# Altium footprint library MY_LIB_Connectors_Amass.PcbLib: 25 footprints (part 2 of 2)
Each footprint in its own frame and in the unit in brackets; x right, y up, seen from the top. Pads: shape width x height; smd on the part's side, far side on the other; paste and mask are expansions set on the pad; w line width, h text height; cw(c..) or ccw(c..) is an arc to the next point about the centre after c.
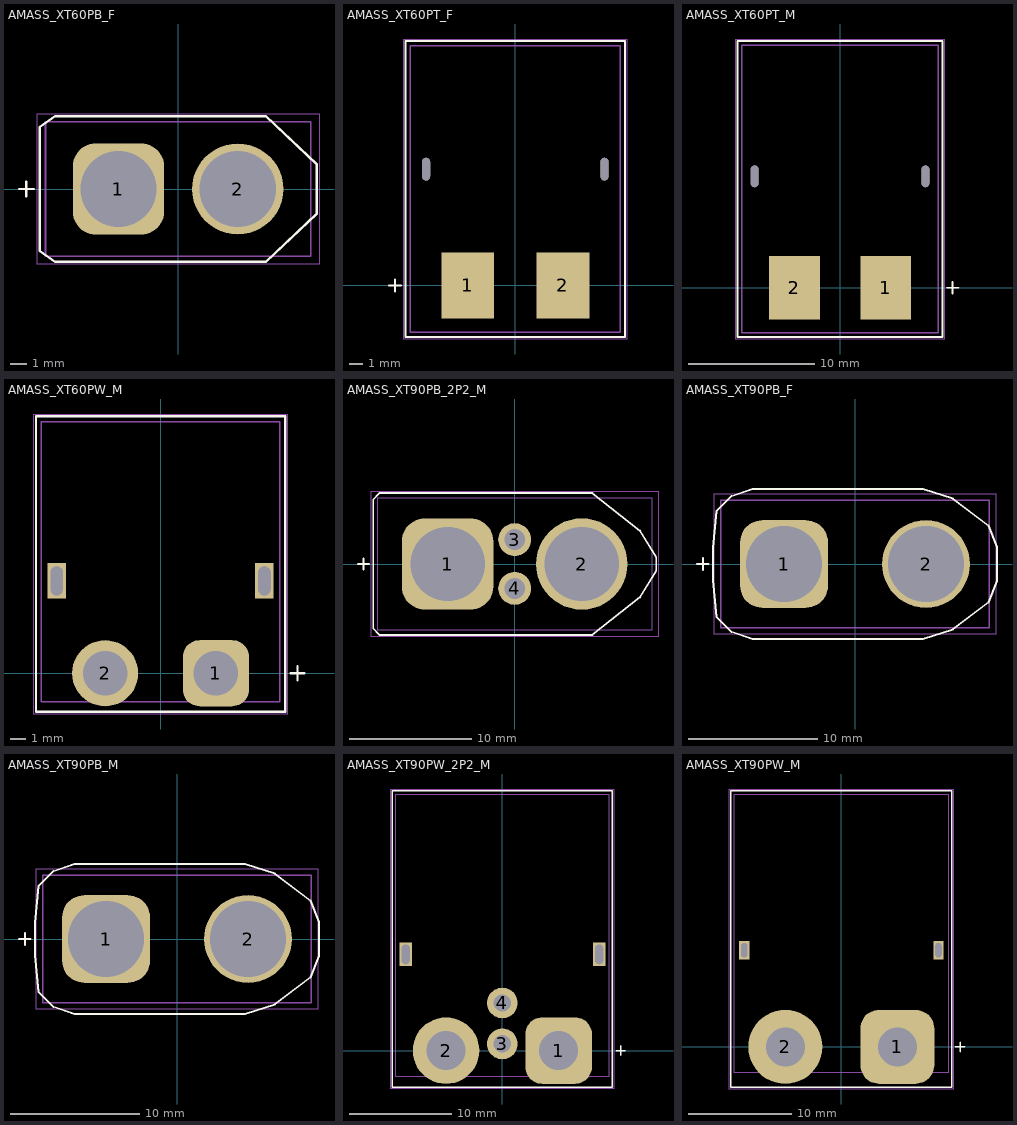
[diagram p1: the footprints below, top view; thin cyan lines are the x and y axes]

## AMASS_XT60PB_F [mm] "AMASS_XT60PB_F; AMASS board-mount connector"
height 16.7
pads (2):
  rrect50% 5.5x5.5 hole 4.6 paste+0 mask+0.05: 1(-3.6,0)
  round 5.5 hole 4.6 paste+0 mask+0.05: 2(3.6,0)
Top Overlay:
  lines w0.15: -9.6,0 -8.7,0 ; -9.15,-0.45 -9.15,0.45 ; -8.35,-3.73 -7.412,-4.4 5.289,-4.4 8.35,-1.501 8.35,1.501 5.289,4.4 -7.412,4.4 -8.35,3.73 -8.35,-3.73
Mechanical 1:
  lines w0.1: -8,-4.05 8,-4.05 8,4.05 -8,4.05 -8,-4.05
Mechanical 15:
  lines w0.05: -8.5,-4.55 8.5,-4.55 8.5,4.55 -8.5,4.55 -8.5,-4.55
3D body "AMASS_XT60PB_F.step": height 16.7, standoff -3, extent -8,-4.05 8,4.05

## AMASS_XT60PT_F [mm] "AMASS_XT60PT_F; AMASS board-mount connector"
height 10
pads (4):
  rect 4x5 smd paste+0 mask+0.05: 1(-3.6,0) 2(3.6,0)
  oval 0.6x1.7 hole 0.6 slot 1.7 at 90 deg unplated paste+0 mask+0.05: ""(-6.75,8.8) ""(6.75,8.8)
Top Overlay:
  lines w0.15: -9.55,0 -8.65,0 ; -9.1,-0.45 -9.1,0.45 ; -8.3,-3.9 8.3,-3.9 8.3,18.5 -8.3,18.5 -8.3,-3.9
Mechanical 1:
  lines w0.1: -7.95,-3.55 7.95,-3.55 7.95,18.15 -7.95,18.15 -7.95,-3.55
Mechanical 15:
  lines w0.05: -8.45,-4.05 8.45,-4.05 8.45,18.65 -8.45,18.65 -8.45,-4.05
3D body "AMASS_XT60PT_F.step": height 8.4, standoff -1.5, extent -7.95,-3.55 7.95,18.15

## AMASS_XT60PT_M [mm] "AMASS_XT60PT_M; AMASS board-mount connector"
height 8.4
pads (4):
  rect 4x5 smd paste+0 mask+0.05: 1(3.6,0) 2(-3.6,0)
  oval 0.6x1.7 hole 0.6 slot 1.7 at 90 deg unplated paste+0 mask+0.05: ""(-6.75,8.8) ""(6.75,8.8)
Top Overlay:
  lines w0.15: 8.45,0 9.35,0 ; 8.9,-0.45 8.9,0.45 ; -8.1,-3.9 8.1,-3.9 8.1,19.5 -8.1,19.5 -8.1,-3.9
Mechanical 1:
  lines w0.1: -7.75,-3.55 7.75,-3.55 7.75,19.15 -7.75,19.15 -7.75,-3.55
Mechanical 15:
  lines w0.05: -8.25,-4.05 8.25,-4.05 8.25,19.65 -8.25,19.65 -8.25,-4.05
3D body "AMASS_XT60PT_M.step": height 8.4, standoff -1.5, extent -7.75,-3.55 7.75,19.15

## AMASS_XT60PW_M [mm] "AMASS_XT60PW_M; AMASS board-mount connector"
height 8.4
pads (4):
  rrect50% 4.3x4.3 hole 2.9 paste+0 mask+0.05: 1(3.6,0)
  round 4.3 hole 2.9 paste+0 mask+0.05: 2(-3.6,0)
  rect 1.2x2.3 hole 0.8 slot 1.9 at 90 deg paste+0 mask+0.05: ""(-6.75,6) ""(6.75,6)
Top Overlay:
  lines w0.15: 8.45,0 9.35,0 ; 8.9,-0.45 8.9,0.45 ; -8.1,-2.5 8.1,-2.5 8.1,16.7 -8.1,16.7 -8.1,-2.5
Mechanical 1:
  lines w0.1: -7.75,-1.85 7.75,-1.85 7.75,16.35 -7.75,16.35 -7.75,-1.85
Mechanical 15:
  lines w0.05: -8.25,-2.65 8.25,-2.65 8.25,16.85 -8.25,16.85 -8.25,-2.65
3D body "AMASS_XT60PW_M.step": height 8.1, standoff -3, extent -7.75,-1.85 7.75,16.35

## AMASS_XT90PB_2P2_M [mm] "AMASS_XT90PB_2P2_M; AMASS board-mount connector"
height 20.7
pads (4):
  rrect50% 7.5x7.5 hole 6.1 paste+0 mask+0.05: 1(-5.5,0)
  round 7.5 hole 6.1 paste+0 mask+0.05: 2(5.5,0)
  round 2.7 hole 1.7 paste+0 mask+0.05: 3(0,2) 4(0,-2)
Top Overlay:
  lines w0.15: -12.85,0 -11.95,0 ; -12.4,-0.45 -12.4,0.45 ; -11.6,-5.292 -11.098,-5.81 6.371,-5.81 10.266,-2.736 11.6,-0.548 11.6,0.548 10.266,2.736 6.371,5.81 -11.098,5.81 -11.6,5.292 -11.6,-5.292
Mechanical 1:
  lines w0.1: -11.25,-5.45 11.25,-5.45 11.25,5.45 -11.25,5.45 -11.25,-5.45
Mechanical 15:
  lines w0.05: -11.75,-5.95 11.75,-5.95 11.75,5.95 -11.75,5.95 -11.75,-5.95
3D body "AMASS_XT90PB_2P2_M.step": height 20.7, standoff -3, extent -11.25,-5.45 11.25,5.45

## AMASS_XT90PB_F [mm] "AMASS_XT90PB_F; AMASS board-mount connector"
height 19.7
pads (2):
  rrect50% 6.8x6.8 hole 5.9 paste+0 mask+0.05: 1(-5.5,0)
  round 6.8 hole 5.9 paste+0 mask+0.05: 2(5.5,0)
Top Overlay:
  lines w0.15: -12.25,0 -11.35,0 ; -11.8,-0.45 -11.8,0.45 ; -11,-1.266 -10.737,-4.108 -9.589,-5.256 -7.957,-5.8 5.254,-5.8 7.583,-5.065 10.339,-2.97 11,-1.317 11,1.317 10.339,2.97 7.583,5.065 5.254,5.8 -7.957,5.8 -9.589,5.256 -10.737,4.108 -11,1.266 -11,-1.266
Mechanical 1:
  lines w0.1: -10.4,-4.95 10.4,-4.95 10.4,4.95 -10.4,4.95 -10.4,-4.95
Mechanical 15:
  lines w0.05: -10.9,-5.45 10.9,-5.45 10.9,5.45 -10.9,5.45 -10.9,-5.45
3D body "AMASS_XT90PB_F.step": height 19.7, standoff -2.8, extent -10.4,-4.95 10.4,4.95

## AMASS_XT90PB_M [mm] "AMASS_XT90PB_M; AMASS board-mount connector"
height 20.7
pads (2):
  rrect50% 6.8x6.8 hole 5.9 paste+0 mask+0.05: 1(-5.5,0)
  round 6.8 hole 5.9 paste+0 mask+0.05: 2(5.5,0)
Top Overlay:
  lines w0.15: -12.25,0 -11.35,0 ; -11.8,-0.45 -11.8,0.45 ; -11,-1.266 -10.737,-4.108 -9.589,-5.256 -7.957,-5.8 5.254,-5.8 7.583,-5.065 10.339,-2.97 11,-1.317 11,1.317 10.339,2.97 7.583,5.065 5.254,5.8 -7.957,5.8 -9.589,5.256 -10.737,4.108 -11,1.266 -11,-1.266
Mechanical 1:
  lines w0.1: -10.4,-4.95 10.4,-4.95 10.4,4.95 -10.4,4.95 -10.4,-4.95
Mechanical 15:
  lines w0.05: -10.9,-5.45 10.9,-5.45 10.9,5.45 -10.9,5.45 -10.9,-5.45
3D body "AMASS_XT90PB_M.step": height 20.7, standoff -2.8, extent -10.4,-4.95 10.4,4.95

## AMASS_XT90PW_2P2_M [mm] "AMASS_XT90PW_2P2_M; AMASS board-mount connector"
height 9.9
pads (6):
  rrect50% 6.5x6.5 hole 3.8 paste+0 mask+0.05: 1(5.5,0)
  round 6.5 hole 3.8 paste+0 mask+0.05: 2(-5.5,0)
  round 3 hole 1.7 paste+0 mask+0.05: 3(0,0.65) 4(0,4.65)
  rect 1.2x2.3 hole 0.8 slot 1.9 at 90 deg paste+0 mask+0.05: ""(-9.45,9.4) ""(9.45,9.4)
Top Overlay:
  lines w0.15: 11.1,0 12,0 ; 11.55,-0.45 11.55,0.45 ; -10.75,-3.6 10.75,-3.6 10.75,25.4 -10.75,25.4 -10.75,-3.6
Mechanical 1:
  lines w0.1: -10.4,-2.55 10.4,-2.55 10.4,25.05 -10.4,25.05 -10.4,-2.55
Mechanical 15:
  lines w0.05: -10.9,-3.75 10.9,-3.75 10.9,25.55 -10.9,25.55 -10.9,-3.75
3D body "AMASS_XT90PW_2P2_M.step": height 10.2, standoff -2.8, extent -10.4,-2.55 10.4,25.05

## AMASS_XT90PW_M [mm] "AMASS_XT90PW_M; AMASS board-mount connector"
height 10.2
pads (4):
  rrect50% 7.2x7.2 hole 3.8 paste+0 mask+0.05: 1(5.45,0)
  round 7.2 hole 3.8 paste+0 mask+0.05: 2(-5.45,0)
  rect 1x1.8 hole 0.6 slot 1.4 at 90 deg paste+0 mask+0.05: ""(-9.45,9.4) ""(9.45,9.4)
Top Overlay:
  lines w0.15: 11.1,0 12,0 ; 11.55,-0.45 11.55,0.45 ; -10.75,-3.95 10.75,-3.95 10.75,24.94 -10.75,24.94 -10.75,-3.95
Mechanical 1:
  lines w0.1: -10.4,-2.51 10.4,-2.51 10.4,24.59 -10.4,24.59 -10.4,-2.51
Mechanical 15:
  lines w0.05: -10.9,-4.1 10.9,-4.1 10.9,25.09 -10.9,25.09 -10.9,-4.1
3D body "AMASS_XT90PW_M.step": height 10.2, standoff -3.5, extent -10.4,-2.51 10.4,24.59